# Altium footprint library WR-SMA.PcbLib: 59 footprints (part 4 of 4)
Each footprint in its own frame and in the unit in brackets; x right, y up, seen from the top. Pads: shape width x height; smd on the part's side, far side on the other; paste and mask are expansions set on the pad; w line width, h text height; cw(c..) or ccw(c..) is an arc to the next point about the centre after c.
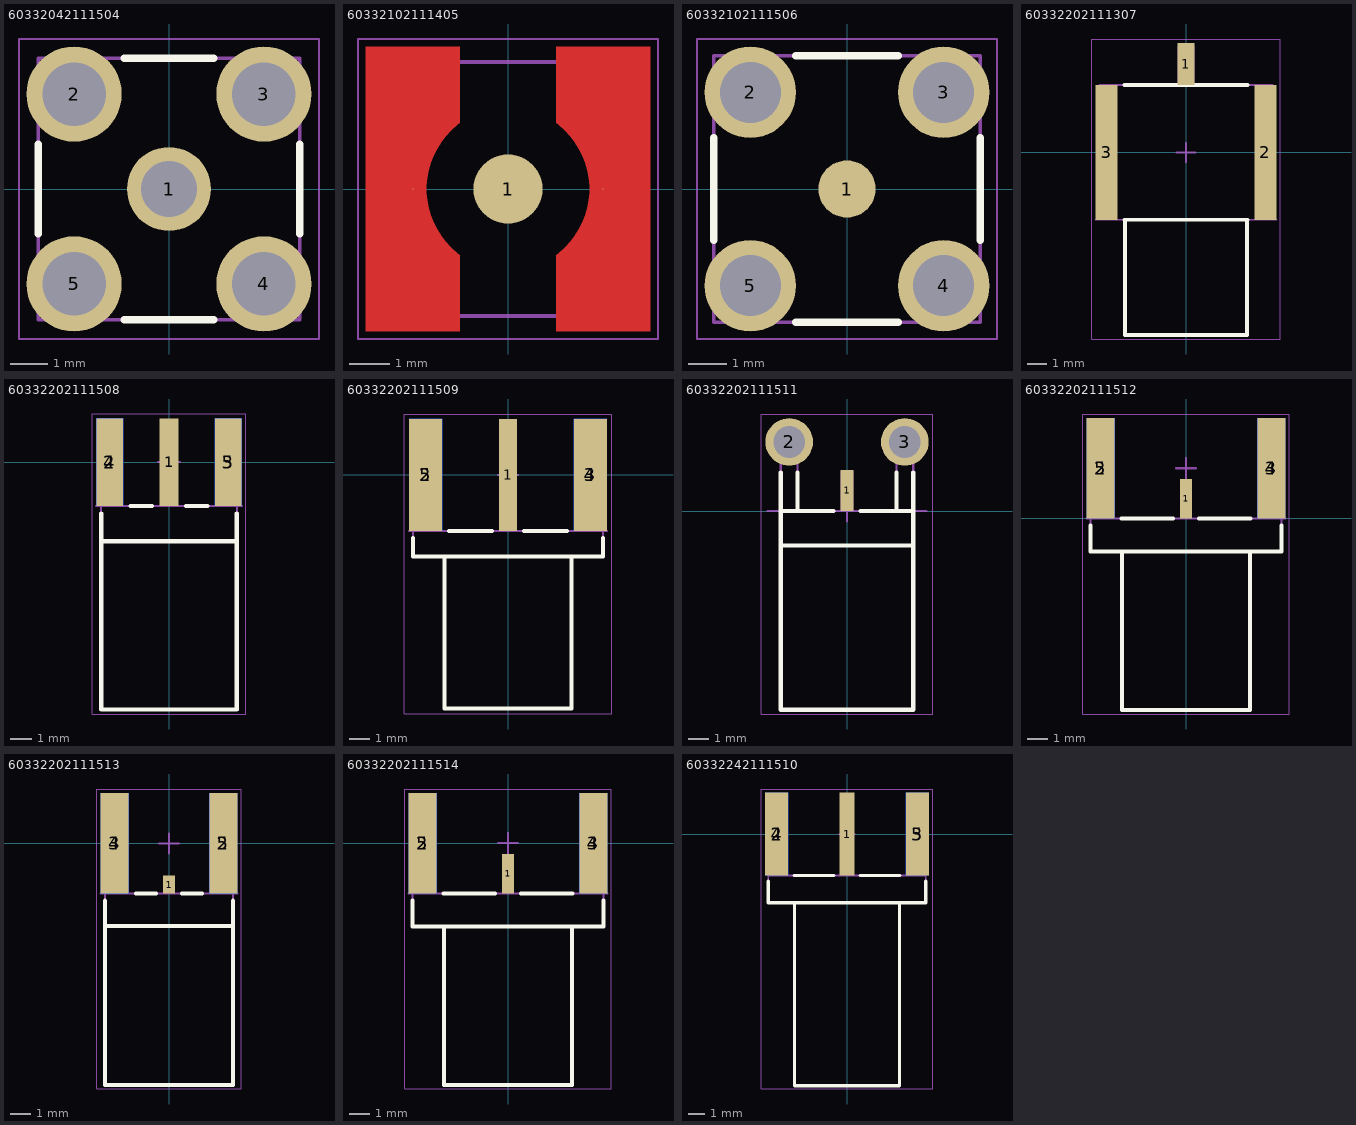
[diagram p3: the footprints below, top view; thin cyan lines are the x and y axes]

## 60332042111504 [mm] "WR_SMA SMA Straight Bulkhead Jack PCB Mount"
height 20.83
pads (5):
  round 2.25 hole 1.5: 1(0,0)
  round 2.55 hole 1.7: 2(-2.54,2.54) 3(2.54,2.54) 4(2.54,-2.54) 5(-2.54,-2.54)
Top Overlay:
  lines w0.2: -3.5,-1.2 -3.5,1.2 ; -1.2,-3.5 1.2,-3.5 ; -1.2,3.5 1.2,3.5 ; 3.5,-1.2 3.5,1.2
Top Assembly:
  lines w0.1: -3.5,-3.5 -3.5,3.5 3.5,3.5 3.5,-3.5 -3.5,-3.5
Top Designator:
  text ".Designator" at -3.647,-0.357 h1
Top 3D Body:
  lines w0.1: -3.5,-3.5 -3.5,3.5 3.5,3.5 3.5,-3.5 -3.5,-3.5
Top Courtyard:
  lines w0.05: -4.015,-4.015 4.015,-4.015 4.015,4.015 -4.015,4.015 -4.015,-4.015
Top Component Center:
  lines w0.1: -0.5,0 0.5,0 ; 0,-0.5 0,0.5
3D body "60332042111504.stp": height 20.92, standoff -3.85, extent -7.203,-7.206 7.211,7.208

## 60332102111405 [mm]
height 8.84
pads (3):
  round 1.73 smd: 1(0,0)
  round 0.025 smd: 2(-2.38,0) 3(2.38,0)
Top Layer:
  region: 3.555,-3.56 1.205,-3.56 1.205,-1.652 1.281,-1.594 1.425,-1.466 1.557,-1.326 1.674,-1.174 1.777,-1.011 1.865,-0.84 1.935,-0.661 1.989,-0.476 2.025,-0.288 2.043,-0.096 2.043,0.096 2.025,0.288 1.989,0.476 1.935,0.661 1.865,0.84 1.777,1.011 1.674,1.174 1.557,1.326 1.425,1.466 1.281,1.594 1.205,1.652 1.205,3.56 3.555,3.56
  region: -3.555,-3.56 -1.205,-3.56 -1.205,-1.652 -1.281,-1.594 -1.425,-1.466 -1.557,-1.326 -1.674,-1.174 -1.777,-1.011 -1.865,-0.84 -1.935,-0.661 -1.989,-0.476 -2.025,-0.288 -2.043,-0.096 -2.043,0.096 -2.025,0.288 -1.989,0.476 -1.935,0.661 -1.865,0.84 -1.777,1.011 -1.674,1.174 -1.557,1.326 -1.425,1.466 -1.281,1.594 -1.205,1.652 -1.205,3.56 -3.555,3.56
Top Assembly:
  lines w0.1: -3.175,-3.175 -3.175,3.175 3.175,3.175 3.175,-3.175 -3.175,-3.175
Top Designator:
  text ".Designator" at -3.647,-0.357 h1
  text ".Designator" at -3.647,-0.357 h1
Top 3D Body:
  lines w0.1: -3.175,-3.175 3.175,-3.175 3.175,3.175 -3.175,3.175 -3.175,-3.175
Top Courtyard:
  lines w0.05: -3.755,-3.755 3.755,-3.755 3.755,3.755 -3.755,3.755 -3.755,-3.755
Top Component Center:
  lines w0.1: -0.5,0 0.5,0 -0.5,0 ; 0,-0.5 0,0.5 0,-0.5
3D body "60332102111405.stp": height 8.99, standoff 0.05, extent -3.175,-3.175 3.175,3.175

## 60332102111506 [mm] "ConSMA SMA PCB SMT Jack Straight with THT Grounding Pins"
pads (5):
  round 1.5 smd: 1(0,0)
  round 2.4 hole 1.6: 2(-2.54,2.54) 3(2.54,2.54) 4(2.54,-2.54) 5(-2.54,-2.54)
Top Overlay:
  lines w0.2: -3.5,-1.35 -3.5,1.35 ; -1.35,-3.5 1.35,-3.5 ; -1.35,3.5 1.35,3.5 ; 3.5,-1.35 3.5,1.35
Top Assembly:
  lines w0.1: -3.5,-3.5 -3.5,3.5 3.5,3.5 3.5,-3.5 -3.5,-3.5
Top Designator:
  text ".Designator" at -3.647,-0.357 h1
Top 3D Body:
  lines w0.1: -3.5,-3.5 -3.5,3.5 3.5,3.5 3.5,-3.5 -3.5,-3.5
Top Courtyard:
  lines w0.05: -3.94,-3.94 3.94,-3.94 3.94,3.94 -3.94,3.94 -3.94,-3.94
Top Component Center:
  lines w0.1: -0.5,0 0.5,0 ; 0,-0.5 0,0.5
3D body "60332102111506.stp": height 9.62, standoff -1.84, extent -3.5,-3.5 3.5,3.5

## 60332202111307 [mm]
height 4
pads (3):
  rect 0.9x2.2 smd: 1(0,4.6)
  rect 1.15x7 smd: 2(4.125,0) 3(-4.125,0)
Top Overlay:
  lines w0.2: -3.2,-3.5 3.2,-3.5 ; -3.2,3.5 3.2,3.5 ; -3.175,-3.5 -3.175,-9.5 3.175,-9.5 3.175,-3.5
Assembly Notes:
  lines w0.1: -4.7,-3.5 4.7,-3.5
  text "PCB END" at -1.564,-4.356 h0.8
Top Assembly:
  lines w0.1: -3.175,-3.5 -3.175,-9.5 3.175,-9.5 3.175,-3.5 ; -0.38,3.5 -0.38,5.5 0.38,5.5 0.38,3.5 ; -4.5,-3.5 4.5,-3.5 4.5,3.5 -4.5,3.5 -4.5,-3.5
Top Designator:
  text ".Designator" at -3.647,-0.357 h1
  text ".Designator" at -3.647,-0.357 h1
Top 3D Body:
  lines w0.1: -3.175,-3.5 -3.175,-9.5 3.175,-9.5 3.175,-3.5 ; -0.38,3.5 -0.38,5.5 0.38,5.5 0.38,3.5 ; -4.5,-3.5 -4.5,3.5 4.5,3.5 4.5,-3.5 -4.5,-3.5
Top Courtyard:
  lines w0.05: -4.9,-9.7 4.9,-9.7 4.9,5.9 -4.9,5.9 -4.9,-9.7
Top Component Center:
  lines w0.1: -0.5,0 0.5,0 -0.5,0 ; 0,-0.5 0,0.5 0,-0.5
3D body "60332202111307.stp": height 4, standoff -3, extent -4.498,-9.5 4.498,5.5

## 60332202111508 [mm]
height 6.35
pads (5):
  rect 0.9x4.1 smd: 1(0,0)
  rect 1.25x4.1 smd: 2(-2.775,0) 3(2.775,0)
  rect 1.25x4.1 smd far side: 4(-2.775,0) 5(2.775,0)
Top Overlay:
  lines w0.2: -3.175,-3.7 3.175,-3.7 ; -3.175,-2.4 -3.175,-11.57 3.175,-11.57 3.175,-2.4 ; -1.8,-2.05 -0.8,-2.05 ; 0.8,-2.05 1.8,-2.05
Assembly Notes:
  lines w0.1: -3.4,-2.05 3.4,-2.05
  text "PCB End" at -1.4,-2.75 h0.8
Top Assembly:
  lines w0.1: -3.175,-3.7 3.175,-3.7 ; -3.175,-2.05 3.175,-2.05 ; -2.365,-2.05 -2.365,1.76 -3.175,1.76 -3.175,-11.57 3.175,-11.57 3.175,1.76 2.365,1.76 2.365,-2.05 ; -0.38,-2.05 -0.38,1.76 0.38,1.76 0.38,-2.05
Top Designator:
  text ".Designator" at -3.647,-0.357 h1
Top 3D Body:
  lines w0.1: -3.175,-3.7 3.175,-3.7 ; -3.175,-2.05 3.175,-2.05 ; -2.365,-2.05 -2.365,1.76 -3.175,1.76 -3.175,-11.57 3.175,-11.57 3.175,1.76 2.365,1.76 2.365,-2.05 ; -0.38,-2.05 -0.38,1.76 0.38,1.76 0.38,-2.05
Top Courtyard:
  lines w0.05: -3.6,-11.781 3.6,-11.781 3.6,2.25 -3.6,2.25 -3.6,-11.781
Top Component Center:
  lines w0.1: -0.5,0 0.5,0 ; 0,-0.5 0,0.5
3D body "60332202111508.stp": height 3.57, standoff -2.78, extent -3.175,-11.57 3.175,1.9

## 60332202111509 [mm]
height 7.92
pads (5):
  rect 0.9x5.6 smd: 1(0,0)
  rect 1.65x5.6 smd: 2(-4.125,0) 3(4.125,0)
  rect 1.65x5.6 smd far side: 4(4.125,0) 5(-4.125,0)
Top Overlay:
  lines w0.2: -4.76,-3.15 -4.76,-4.07 4.76,-4.07 4.76,-3.15 ; -3.175,-4.07 -3.175,-11.69 3.175,-11.69 3.175,-4.07 ; -2.95,-2.8 -0.8,-2.8 ; 0.8,-2.8 2.95,-2.8
Assembly Notes:
  lines w0.1: -4.95,-2.8 4.95,-2.8
  text "PCB End" at -1.5,-3.5 h0.8
Top Assembly:
  lines w0.1: -4.76,-2.8 4.76,-2.8 ; -3.49,-2.8 -3.49,2.58 -4.76,2.58 -4.76,-4.07 4.76,-4.07 4.76,2.58 3.49,2.58 3.49,-2.8 ; -3.175,-4.07 -3.175,-11.69 3.175,-11.69 3.175,-4.07 ; -0.38,-2.8 -0.38,2.58 0.38,2.58 0.38,-2.8
Top Designator:
  text ".Designator" at -3.647,-0.357 h1
  text ".Designator" at -3.647,-0.357 h1
Top 3D Body:
  lines w0.1: -4.76,-2.8 4.76,-2.8 ; -3.49,-2.8 -3.49,2.58 -4.76,2.58 -4.76,-4.07 4.76,-4.07 4.76,2.58 3.49,2.58 3.49,-2.8 ; -3.175,-4.07 -3.175,-11.69 3.175,-11.69 3.175,-4.07 ; -0.38,-2.8 -0.38,2.58 0.38,2.58 0.38,-2.8
Top Courtyard:
  lines w0.05: -5.2,-11.955 5.2,-11.955 5.2,3.05 -5.2,3.05 -5.2,-11.955
Top Component Center:
  lines w0.1: -0.5,0 0.5,0 -0.5,0 ; 0,-0.5 0,0.5 0,-0.5
3D body "60332202111509.stp": height 4.36, standoff -3.56, extent -4.76,-11.69 4.76,2.69

## 60332202111511 [mm]
height 6.35
pads (3):
  rect 0.61x1.97 smd: 1(0,0.985)
  round 2.28 hole 1.52: 2(-2.77,3.31) 3(2.77,3.31)
Top Overlay:
  lines w0.2: -3.175,-1.65 3.175,-1.65 ; -3.175,0 -0.65,0 ; -3.175,1.85 -3.175,-9.53 3.175,-9.53 3.175,1.85 ; -2.365,0 -2.365,1.85 ; 0.65,0 3.175,0 ; 2.365,0 2.365,1.85
Assembly Notes:
  lines w0.1: -3.805,0 3.805,0
  text "PCB End" at -1.416,-0.7 h0.8
Top Assembly:
  lines w0.1: -3.175,-1.65 3.175,-1.65 ; -3.175,0 3.175,0 ; -2.365,0 -2.365,3.81 -3.175,3.81 -3.175,-9.53 3.175,-9.53 3.175,3.81 2.365,3.81 2.365,0 ; -0.255,0 -0.255,1.9 0.255,1.9 0.255,0
Top Designator:
  text ".Designator" at -3.647,-0.357 h1
  text ".Designator" at -3.647,-0.357 h1
Top 3D Body:
  lines w0.1: -3.175,-1.65 3.175,-1.65 ; -3.175,0 3.175,0 ; -2.365,0 -2.365,3.81 -3.175,3.81 -3.175,-9.53 3.175,-9.53 3.175,3.81 2.365,3.81 2.365,0 ; -0.255,0 -0.255,1.9 0.255,1.9 0.255,0
Top Courtyard:
  lines w0.05: -4.11,-9.73 -4.11,4.65 4.11,4.65 4.11,-9.73 -4.11,-9.73
Top Component Center:
  lines w0.1: -0.5,0 0.5,0 -0.5,0 ; 0,-0.5 0,0.5 0,-0.5
3D body "60332202111511.stp": height 3.37, standoff -2.98, extent -3.175,-9.53 3.175,3.81

## 60332202111512 [mm]
height 7.92
pads (5):
  rect 0.61x1.97 smd: 1(0,0.985)
  rect 1.4x5 smd: 2(-4.25,2.5) 3(4.25,2.5)
  rect 1.4x5 smd far side: 4(4.25,2.5) 5(-4.25,2.5)
Top Overlay:
  lines w0.2: -4.76,-0.35 -4.76,-1.64 4.76,-1.64 4.76,-0.35 ; -3.2,0 -0.65,0 ; -3.175,-1.64 -3.175,-9.53 3.175,-9.53 3.175,-1.64 ; 0.65,0 3.2,0
Assembly Notes:
  lines w0.1: -4.95,0 4.95,0
  text "PCB End" at -1.4,-0.7 h0.8
Top Assembly:
  lines w0.1: -4.76,0 4.76,0 ; -3.74,0 -3.74,4.76 -4.76,4.76 -4.76,-1.64 4.76,-1.64 4.76,4.76 3.74,4.76 3.74,0 ; -3.175,-1.64 -3.175,-9.53 3.175,-9.53 3.175,-1.64 ; -0.255,0 -0.255,1.9 0.255,1.9 0.255,0
Top Designator:
  text ".Designator" at -3.647,2.143 h1
  text ".Designator" at -3.647,2.143 h1
Top 3D Body:
  lines w0.1: -4.76,0 4.76,0 ; -3.74,0 -3.74,4.76 -4.76,4.76 -4.76,-1.64 4.76,-1.64 4.76,4.76 3.74,4.76 3.74,0 ; -3.175,-1.64 -3.175,-9.53 3.175,-9.53 3.175,-1.64 ; -0.255,0 -0.255,1.9 0.255,1.9 0.255,0
Top Courtyard:
  lines w0.05: -5.15,-9.73 -5.15,5.2 5.15,5.2 5.15,-9.73 -5.15,-9.73
Top Component Center:
  lines w0.1: -0.5,2.5 0.5,2.5 -0.5,2.5 ; 0,2 0,3 0,2
3D body "60332202111512.stp": height 4.16, standoff -3.77, extent -4.76,-9.53 4.76,4.76

## 60332202111513 [mm]
height 6.35
pads (5):
  rect 0.61x0.9 smd: 1(0,-2.05)
  rect 1.4x5 smd: 2(2.7,0) 3(-2.7,0)
  rect 1.4x5 smd far side: 4(-2.7,0) 5(2.7,0)
Top Overlay:
  lines w0.2: -3.175,-4.1 3.175,-4.1 ; -3.175,-2.85 -3.175,-12 3.175,-12 3.175,-2.85 ; -1.65,-2.5 -0.65,-2.5 ; 0.65,-2.5 1.65,-2.5
Assembly Notes:
  lines w0.1: -3.4,-2.5 3.4,-2.5
  text "PCB End" at -1.4,-3.2 h0.8
Top Assembly:
  lines w0.1: -3.175,-4.1 3.175,-4.1 ; -3.175,-2.5 3.175,-2.5 ; -2.175,-2.5 -2.175,2.2 -3.175,2.2 -3.175,-12 3.175,-12 3.175,2.2 2.175,2.2 2.175,-2.5 ; -0.255,-2.5 -0.255,-1.7 0.255,-1.7 0.255,-2.5
Top Designator:
  text ".Designator" at -3.647,-0.357 h1
  text ".Designator" at -3.647,-0.357 h1
Top 3D Body:
  lines w0.1: -3.175,-4.1 3.175,-4.1 ; -3.175,-2.5 3.175,-2.5 ; -2.175,-2.5 -2.175,2.2 -3.175,2.2 -3.175,-12 3.175,-12 3.175,2.2 2.175,2.2 2.175,-2.5 ; -0.255,-2.5 -0.255,-1.7 0.255,-1.7 0.255,-2.5
Top Courtyard:
  lines w0.05: -3.6,-12.198 3.6,-12.198 3.6,2.7 -3.6,2.7 -3.6,-12.198
Top Component Center:
  lines w0.1: -0.5,0 0.5,0 -0.5,0 ; 0,-0.5 0,0.5 0,-0.5
3D body "60332202111513.stp": height 3.37, standoff -2.98, extent -3.175,-11.998 3.175,2.202

## 60332202111514 [mm]
height 7.92
pads (5):
  rect 0.61x1.97 smd: 1(0,-1.515)
  rect 1.4x5 smd: 2(-4.25,0) 3(4.25,0)
  rect 1.4x5 smd far side: 4(4.25,0) 5(-4.25,0)
Top Overlay:
  lines w0.2: -4.76,-2.85 -4.76,-4.14 4.76,-4.14 4.76,-2.85 ; -3.2,-2.5 -0.65,-2.5 ; -3.175,-4.14 -3.175,-12.03 3.175,-12.03 3.175,-4.14 ; 0.65,-2.5 3.2,-2.5
Assembly Notes:
  lines w0.1: -4.95,-2.5 4.95,-2.5
  text "PCB End" at -1.4,-3.2 h0.8
Top Assembly:
  lines w0.1: -4.76,-2.5 4.76,-2.5 ; -3.74,-2.5 -3.74,2.26 -4.76,2.26 -4.76,-4.14 4.76,-4.14 4.76,2.26 3.74,2.26 3.74,-2.5 ; -3.175,-4.14 -3.175,-12.03 3.175,-12.03 3.175,-4.14 ; -0.255,-2.5 -0.255,-0.6 0.255,-0.6 0.255,-2.5
Top Designator:
  text ".Designator" at -3.647,-0.357 h1
  text ".Designator" at -3.647,-0.357 h1
Top 3D Body:
  lines w0.1: -4.76,-2.5 4.76,-2.5 ; -3.74,-2.5 -3.74,2.26 -4.76,2.26 -4.76,-4.14 4.76,-4.14 4.76,2.26 3.74,2.26 3.74,-2.5 ; -3.175,-4.14 -3.175,-12.03 3.175,-12.03 3.175,-4.14 ; -0.255,-2.5 -0.255,-0.6 0.255,-0.6 0.255,-2.5
Top Courtyard:
  lines w0.05: -5.15,-12.235 -5.15,2.7 5.15,2.7 5.15,-12.235 -5.15,-12.235
Top Component Center:
  lines w0.1: -0.5,0 0.5,0 -0.5,0 ; 0,-0.5 0,0.5 0,-0.5
3D body "60332202111514.stp": height 4.16, standoff -3.77, extent -4.76,-12.035 4.76,2.255

## 60332242111510 [mm] "ConSMA SMA Straight Bulkhead Jack end Launch"
height 7.92
pads (5):
  rect 0.9x5 smd: 1(0,0)
  rect 1.4x5 smd: 2(-4.25,0) 3(4.25,0)
  rect 1.4x5 smd far side: 4(-4.25,0) 5(4.25,0)
Top Overlay:
  lines w0.2: -4.76,-2.85 -4.76,-4.15 4.76,-4.15 4.76,-2.85 ; -3.2,-2.5 -0.8,-2.5 ; -3.175,-4.15 -3.175,-15.2 3.175,-15.2 3.175,-4.15 ; 0.8,-2.5 3.2,-2.5
Assembly Notes:
  lines w0.1: -4.76,-2.5 4.76,-2.5
  text "PCB End" at -1.5,-3.2 h0.8
  text "PCB Thickness 1.6mm" at -3.4,-16 h0.8
Top Assembly:
  lines w0.1: -4.76,-2.5 4.76,-2.5 ; -3.74,-2.5 -3.74,2.25 -4.76,2.25 -4.76,-4.15 4.76,-4.15 4.76,2.25 3.74,2.25 3.74,-2.5 ; -3.175,-4.15 -3.175,-15.2 3.175,-15.2 3.175,-4.15 ; -0.38,-2.5 -0.38,2.25 0.38,2.25 0.38,-2.5
Top Designator:
  text ".Designator" at -3.647,-0.357 h1
Top 3D Body:
  lines w0.1: -4.76,-2.5 4.76,-2.5 ; -3.74,-2.5 -3.74,2.25 -4.76,2.25 -4.76,-4.15 4.76,-4.15 4.76,2.25 3.74,2.25 3.74,-2.5 ; -3.175,-4.15 -3.175,-15.2 3.175,-15.2 3.175,-4.15 ; -0.38,-2.5 -0.38,2.25 0.38,2.25 0.38,-2.5
Top Courtyard:
  lines w0.05: -5.175,-15.4 5.175,-15.4 5.175,2.725 -5.175,2.725 -5.175,-15.4
Top Component Center:
  lines w0.1: -0.5,0 0.5,0 ; 0,-0.5 0,0.5
3D body "60332242111510.stp": height 5.6, standoff -4.59, extent -5.096,-15.2 5.096,2.25